# EAGLE library part SRV05 (library Sirokko-parts)
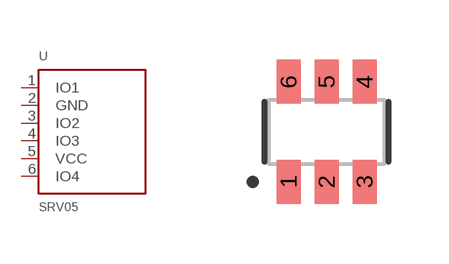
[diagram p2: symbol with the pads of SRV05_SOT23_6; footprint SRV05_SOT23_6]

Designator prefix U

## SRV05 (DATASHEET: https://static.chipdip.ru/lib/303/DOC021303379.pdf; MPN: SRV05-4.TCT)  [SRV05_SOT23_6]
1  IO1  pas
2  GND  pas
3  IO2  pas
4  IO3  pas
5  VCC  pas
6  IO4  pas

## Footprint SRV05_SOT23_6 (pad centres in mm)
smd 0.6 x 1.1: 1 -0.95,-1.25; 2 0,-1.25; 3 0.95,-1.25; 4 0.95,1.25; 5 0,1.25; 6 -0.95,1.25